# EAGLE library part AXK6S50647YG (library dp_devices.v6)
P5KS Narrow Pitch Connectors Header 50 pins, 0.5" pitch http://www.digikey.com/product-detail/en/AXK6S50647YG/255-2539-1-ND/1986702
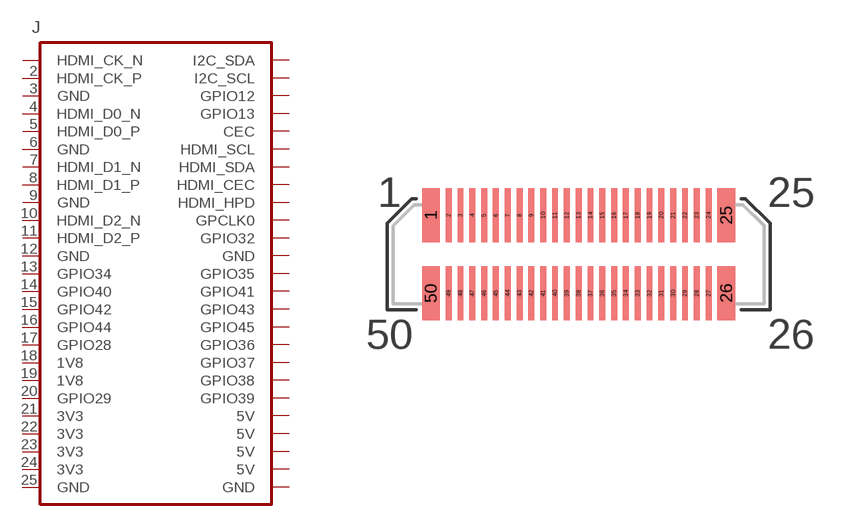
[diagram p160: symbol with the pads of AXK6S50647YG; footprint AXK6S50647YG]

Designator prefix J

## AXK6S50647YG  [AXK6S50647YG]
1  HDMI_CK_N  pas
2  HDMI_CK_P  pas
3  GND  pas
4  HDMI_D0_N  pas
5  HDMI_D0_P  pas
6  GND  pas
7  HDMI_D1_N  pas
8  HDMI_D1_P  pas
9  GND  pas
10  HDMI_D2_N  pas
11  HDMI_D2_P  pas
12  GND  pas
13  GPIO34  pas
14  GPIO40  pas
15  GPIO42  pas
16  GPIO44  pas
17  GPIO28  pas
18  1V8  pas
19  1V8  pas
20  GPIO29  pas
21  3V3  pas
22  3V3  pas
23  3V3  pas
24  3V3  pas
25  GND  pas
26  GND  pas
27  5V  pas
28  5V  pas
29  5V  pas
30  5V  pas
31  GPIO39  pas
32  GPIO38  pas
33  GPIO37  pas
34  GPIO36  pas
35  GPIO45  pas
36  GPIO43  pas
37  GPIO41  pas
38  GPIO35  pas
39  GND  pas
40  GPIO32  pas
41  GPCLK0  pas
42  HDMI_HPD  pas
43  HDMI_CEC  pas
44  HDMI_SDA  pas
45  HDMI_SCL  pas
46  CEC  pas
47  GPIO13  pas
48  GPIO12  pas
49  I2C_SCL  pas
50  I2C_SDA  pas

## Footprint AXK6S50647YG (pad centres in mm)
smd 0.75 x 2.3: 1 -6.25,1.65; 25 6.25,1.65; 26 6.25,-1.65; 50 -6.25,-1.65
smd 0.25 x 2.3: 2 -5.5,1.65; 3 -5,1.65; 4 -4.5,1.65; 5 -4,1.65; 6 -3.5,1.65; 7 -3,1.65; 8 -2.5,1.65; 9 -2,1.65; 10 -1.5,1.65; 11 -1,1.65; 12 -0.5,1.65; 13 0,1.65; 14 0.5,1.65; 15 1,1.65; 16 1.5,1.65; 17 2,1.65; 18 2.5,1.65; 19 3,1.65; 20 3.5,1.65; 21 4,1.65; 22 4.5,1.65; 23 5,1.65; 24 5.5,1.65; 27 5.5,-1.65; 28 5,-1.65; 29 4.5,-1.65; 30 4,-1.65; 31 3.5,-1.65; 32 3,-1.65; 33 2.5,-1.65; 34 2,-1.65; 35 1.5,-1.65; 36 1,-1.65; 37 0.5,-1.65; 38 0,-1.65; 39 -0.5,-1.65; 40 -1,-1.65; 41 -1.5,-1.65; 42 -2,-1.65; 43 -2.5,-1.65; 44 -3,-1.65; 45 -3.5,-1.65; 46 -4,-1.65; 47 -4.5,-1.65; 48 -5,-1.65; 49 -5.5,-1.65